# EAGLE library part MICS-5524 (library MICS-5524)
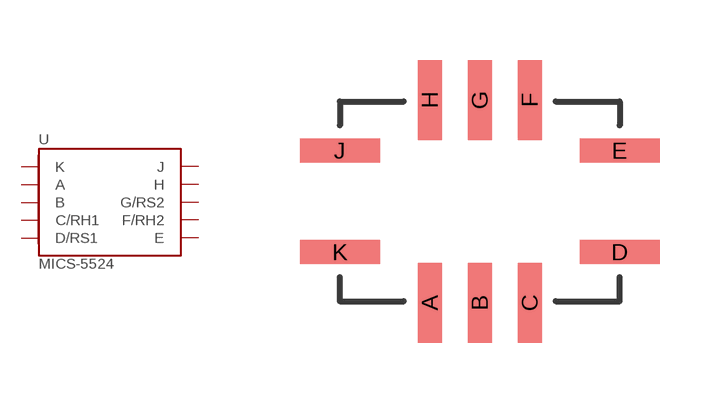
[diagram p0: symbol with the pads of MICS-SMD10; footprint MICS-SMD10]

Designator prefix U

## MICS-5524 (Check_prices: https://www.snapeda.com/parts/MICS-5524/Amphenol/view-part/?ref=eda; Description: Sensor,Single channel metal Oxide sensor for Reducing gases ppb to ppm | Amphenol SGX Sensortech MICS-5524; DigiKey_Part_Number: 6739-MICS-5524CT-ND; MF: Amphenol; MP: MICS-5524; Package: None; SnapEDA_Link: https://www.snapeda.com/parts/MICS-5524/Amphenol/view-part/?ref=snap)  [MICS-SMD10]
A  A  nc
B  B  nc
C  C/RH1  pas
D  D/RS1  pas
E  E  nc
F  F/RH2  pas
G  G/RS2  pas
H  H  nc
J  J  nc
K  K  nc

## Footprint MICS-SMD10 (pad centres in mm)
smd 0.6 x 2: A -1.25,-2.54; B 0,-2.54; C 1.25,-2.54; F 1.25,2.54; G 0,2.54; H -1.25,2.54
smd 2 x 0.6: D 3.5,-1.27; E 3.5,1.27; J -3.5,1.27; K -3.5,-1.27